# Altium schematic symbol library 54602-908LF.SchLib: 1 symbol
Pins are listed as number, name and electrical type; pins without a type are passive.

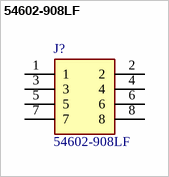
[diagram p0: symbol 54602-908LF]

## 54602-908LF
designator J?
Modular Jack, Input Output Connectors, Cat 3 Single Modular Jack, Horizontal, Board Through Mount, 8P8C, 1 Port; Manufacturer_Name: Amphenol Communications Solutions; Geometry.Height: 12.85mm; Manufacturer_Part_Number: 54602-908LF; Mouser Part Number: *; Mouser Price/Stock: *; Arrow Part Number: 54602-908LF; Arrow Price/Stock: https://www.arrow.com/en/products/54602-908lf/amphenol-fci.html?utm_currency=USD&region=asia; Datasheet Link: https://cdn.amphenol-cs.com/media/wysiwyg/files/drawing/c-bmj-0102.pdf
footprint 54602908LF
pins: 1, 2, 3, 4, 5, 6, 7, 8